# Altium footprint library Miscellaneous Devices.PcbLib: 306 footprints (part 12 of 20)
Each footprint in its own frame and in the unit in brackets; x right, y up, seen from the top. Pads: shape width x height; smd on the part's side, far side on the other; paste and mask are expansions set on the pad; w line width, h text height; cw(c..) or ccw(c..) is an arc to the next point about the centre after c.
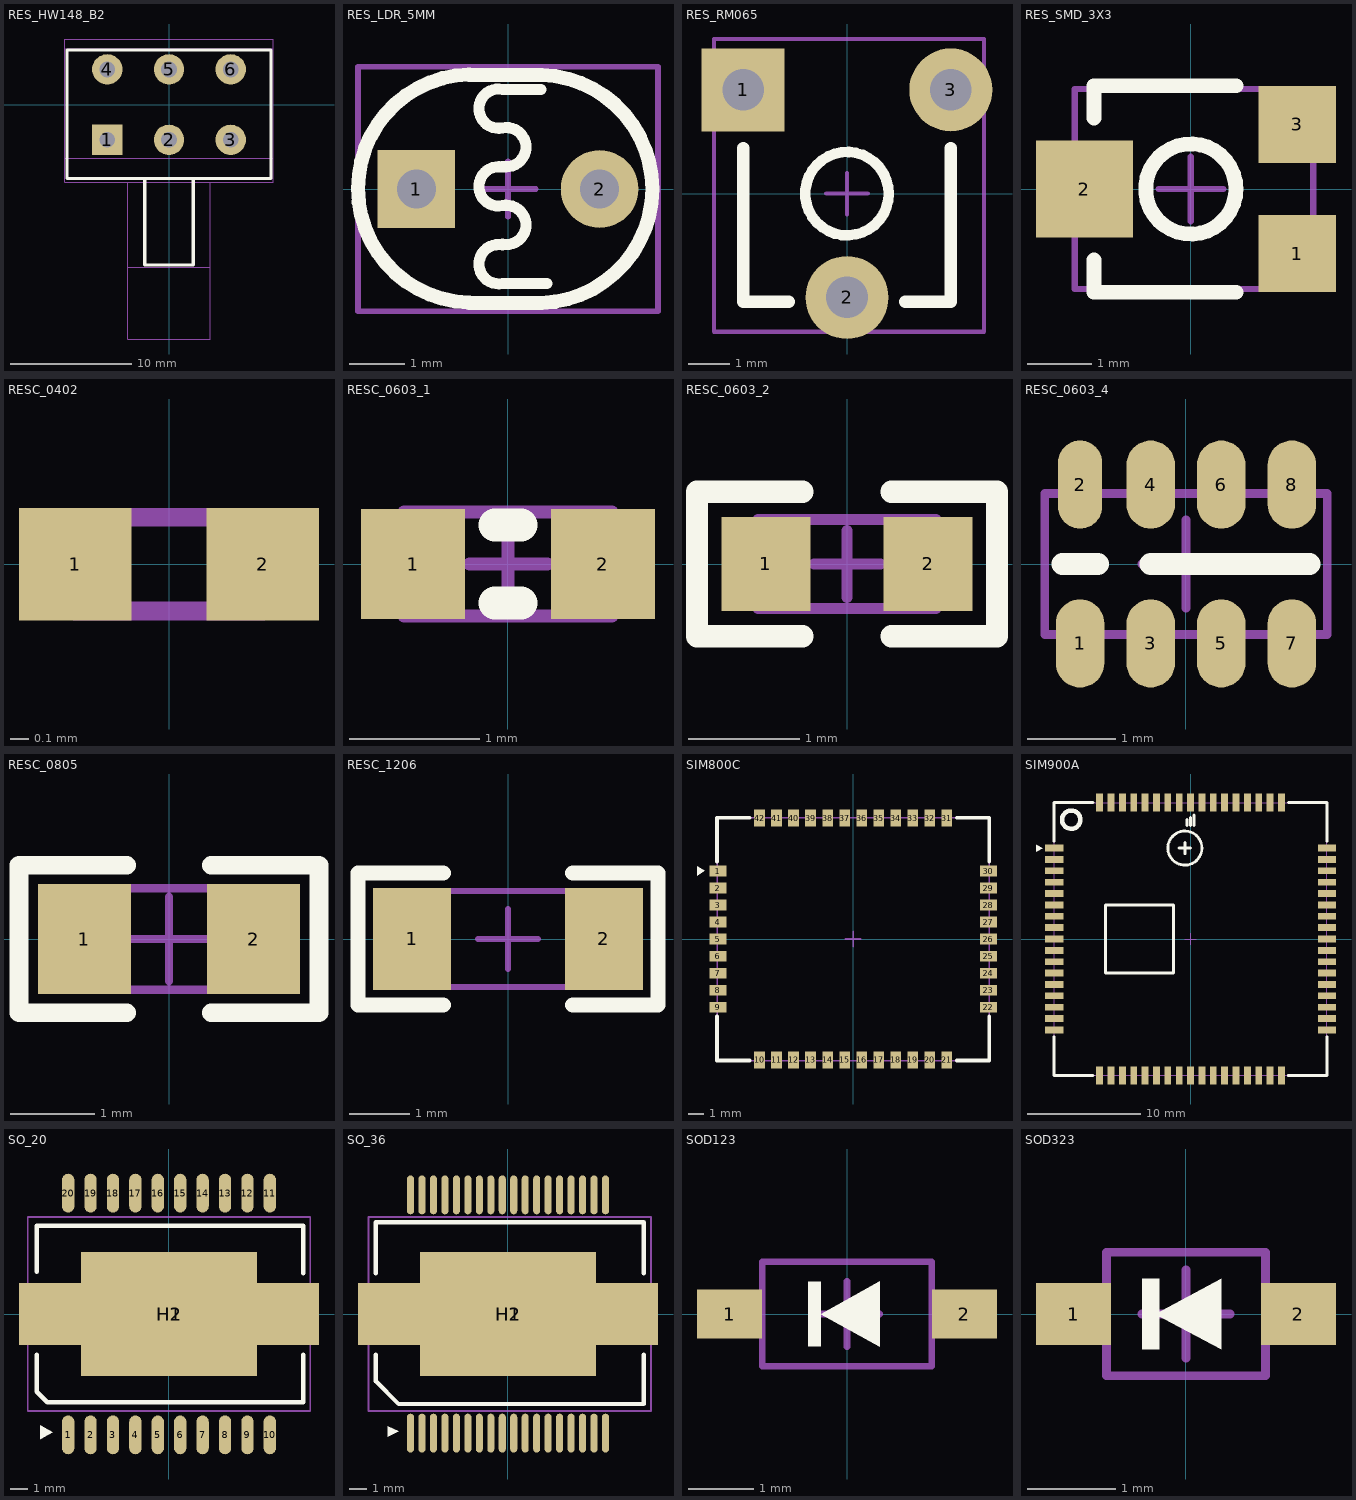
[diagram p11: the footprints below, top view; thin cyan lines are the x and y axes]

## RES_HW148_B2 [mm]
pads (6):
  rect 2.5x2.5 hole 1.3: 1(-5.08,-2.9)
  round 2.5 hole 1.3: 2(0,-2.9) 3(5.08,-2.9) 4(-5.08,2.9) 5(0,2.9) 6(5.08,2.9)
Top Overlay:
  lines w0.254: -2,-6.1 -2,-10.9 -2,-13.2 2,-13.2 2,-10.9 2,-6.1 ; -8.4,-6.1 8.4,-6.1 8.4,4.5 -8.4,4.5 -8.4,-6.1
Mechanical 15:
  lines w0.1: -3.4,-11.3 -3.4,-19.3 3.4,-19.3 3.4,-11.3 ; -3.4,-6.4 -3.4,-13.4 3.4,-13.4 3.4,-6.4 ; -8.6,-4.4 -8.6,4.6 ; -8.6,-4.4 -3.4,-4.4 3.4,-4.4 8.6,-4.4 ; -8.6,-4.4 -8.6,-6.4 8.6,-6.4 8.6,-4.4 ; -8.6,4.6 8.6,4.6 ; -8.6,4.6 -8.6,5.4 8.6,5.4 8.6,4.6 ; 8.6,-4.4 8.6,4.6
3D body: height 21.5, standoff -3, extent -8.5,-36.25 8.5,4.6

## RES_LDR_5MM [mm]
pads (2):
  rect 1.4x1.4 hole 0.7: 1(-1.65,0)
  round 1.4 hole 0.7: 2(1.65,0)
Top Overlay:
  lines w0.2: -0.1,-1.007 ccw(c-0.169,-1.353) -0.1,-1.7 0.7,-1.7 ; -0.1,-0.993 ccw(c-0.031,-0.647) -0.1,-0.3 cw(c-0.169,0.047) -0.1,0.393 ; -0.1,0.407 ccw(c-0.031,0.753) -0.1,1.1 cw(c-0.169,1.447) -0.1,1.793 0.593,1.793
  lines w0.254: -0.703,-2.044 cw(c-0.645,0.009) -0.7,2.063 ; -0.697,-2.05 0.6,-2.05 ccw(c0.545,0.002) 0.604,2.053 -0.69,2.053
Mechanical 15:
  lines w0.1: -0.5,0 0.5,0 ; 0,-0.5 0,0.5 ; -2.7,-2.2 2.7,-2.2 2.7,2.2 -2.7,2.2 -2.7,-2.2
3D body: height 2.34, standoff -2.4, extent -2.605,-2.16 2.605,2.14

## RES_RM065 [mm]
pads (3):
  rect 2x2 hole 1: 1(-2.5,2.5)
  round 2 hole 1: 2(0,-2.5) 3(2.5,2.5)
Top Overlay:
  circle w0.254: c0,0 r1.005
  lines w0.3: -2.5,1.1 -2.5,-2.6 -1.4,-2.6 ; 1.4,-2.6 2.5,-2.6 2.5,1.1
Mechanical 15:
  lines w0.1: -0.5,0 0.5,0 ; 0,-0.5 0,0.5 ; -3.2,-3.325 3.3,-3.325 3.3,3.725 -3.2,3.725 -3.2,-3.325
3D body: height 7.5, standoff -3.4, extent -3.2,-3.325 3.3,3.725

## RES_SMD_3X3 [mm]
pads (3):
  rect 1.2x1.2 smd: 1(1.65,-1) 3(1.65,1)
  rect 1.5x1.5 smd: 2(-1.65,0)
Top Overlay:
  circle w0.23: c0,0 r0.7
  lines w0.23: -1.5,-1.1 -1.5,-1.6 0.7,-1.6 ; -1.5,1.1 -1.5,1.6 0.7,1.6
Mechanical 15:
  lines w0.1: -0.5,0 0.5,0 ; 0,-0.5 0,0.5 ; -1.8,-1.55 -1.8,1.55 1.9,1.55 1.9,-1.55 -1.8,-1.55
3D body: height 1.95, standoff 0, extent -1.795,-1.55 1.895,1.55

## RESC_0402 [mm]
pads (2):
  rect 0.6x0.6 smd mask+0.051: 1(-0.5,0) 2(0.5,0)
Mechanical 15:
  lines w0.1: -0.5,-0.25 0.5,-0.25 0.5,0.25 -0.5,0.25 -0.5,-0.25
3D body: height 0.38, standoff 0, extent -0.5,-0.25 0.5,0.25

## RESC_0603_1 [mm]
pads (2):
  rect 0.8x0.85 smd: 1(-0.73,0) 2(0.73,0)
Top Overlay:
  lines w0.254: -0.1,-0.3 0.1,-0.3 ; -0.1,0.3 0.1,0.3
Mechanical 15:
  lines w0.1: -0.297,0 0.303,0 ; 0,-0.3 0,0.3 ; -0.8,-0.4 0.8,-0.4 0.8,0.4 -0.8,0.4 -0.8,-0.4
3D body: height 0.38, standoff 0, extent -0.8,-0.4 0.8,0.4

## RESC_0603_2 [mm]
pads (2):
  rect 0.8x0.85 smd: 1(-0.73,0) 2(0.73,0)
Top Overlay:
  lines w0.2: -0.4,-0.65 -1.35,-0.65 -1.35,0.65 -0.4,0.65 ; 0.4,-0.65 1.35,-0.65 1.35,0.65 0.4,0.65
Mechanical 15:
  lines w0.1: -0.297,0 0.303,0 ; 0,-0.3 0,0.3 ; -0.8,-0.4 -0.8,0.4 0.8,0.4 0.8,-0.4 -0.8,-0.4
3D body: height 0.38, standoff 0, extent -0.8,-0.4 0.8,0.4

## RESC_0603_4 [mm]
pads (8):
  oval 0.55x1 smd: 1(-1.2,-0.9) 3(-0.4,-0.9) 4(-0.4,0.9) 5(0.4,-0.9) 6(0.4,0.9) 7(1.2,-0.9) 8(1.2,0.9)
  oval 0.5x1 smd: 2(-1.2,0.9)
Top Overlay:
  lines w0.254: -1.4,0 -1,0 ; -0.4,0 1.4,0
Mechanical 15:
  lines w0.1: -0.5,0 0.5,0 ; 0,-0.5 0,0.5 ; -1.6,-0.8 -1.6,0.8 1.6,0.8 1.6,-0.8 -1.6,-0.8
3D body: height 0.5, standoff 0, extent -1.6,-0.8 1.6,0.8

## RESC_0805 [mm]
pads (2):
  rect 1.1x1.3 smd: 1(-1,0) 2(1,0)
Top Overlay:
  lines w0.22: -0.5,-0.875 -1.775,-0.875 -1.775,0.875 -0.5,0.875 ; 0.5,-0.875 1.775,-0.875 1.775,0.875 0.5,0.875
Mechanical 15:
  lines w0.1: -0.5,0 0.5,0 ; 0,-0.5 0,0.5 ; -1,-0.6 1,-0.6 1,0.6 -1,0.6 -1,-0.6
3D body: height 0.5, standoff 0, extent -1,-0.6 1,0.6

## RESC_1206 [mm]
pads (2):
  rect 1.3x1.7 smd: 1(-1.6,0) 2(1.6,0)
Top Overlay:
  lines w0.254: -1.079,-1.1 -2.5,-1.1 -2.5,1.1 -1.079,1.1 ; 1.08,-1.1 2.5,-1.1 2.5,1.1 1.08,1.1
Mechanical 15:
  lines w0.1: -0.5,0 0.5,0 ; 0,-0.5 0,0.5 ; -1.6,-0.8 -1.6,0.8 1.6,0.8 1.6,-0.8 -1.6,-0.8
3D body: height 0.6, standoff 0, extent -1.6,-0.8 1.6,0.8

## SIM800C [mm]
pads (42):
  rect 1.1x0.7 smd: 1(-8.75,4.39) 2(-8.75,3.29) 3(-8.75,2.19) 4(-8.75,1.09) 5(-8.75,-0.01) 6(-8.75,-1.11) 7(-8.75,-2.21) 8(-8.75,-3.31) 9(-8.75,-4.41) 22(8.75,-4.41) 23(8.75,-3.31) 24(8.75,-2.21) 25(8.75,-1.11) 26(8.75,-0.01) 27(8.75,1.09) 28(8.75,2.19) 29(8.75,3.29) 30(8.75,4.39)
  rect 0.7x1.1 smd: 10(-6.05,-7.81) 11(-4.95,-7.81) 12(-3.85,-7.81) 13(-2.75,-7.81) 14(-1.65,-7.81) 15(-0.55,-7.81) 16(0.55,-7.81) 17(1.65,-7.81) 18(2.75,-7.81) 19(3.85,-7.81) 20(4.95,-7.81) 21(6.05,-7.81) 31(6.05,7.81) 32(4.95,7.81) 33(3.85,7.81) 34(2.75,7.81) 35(1.65,7.81) 36(0.55,7.81) 37(-0.55,7.81) 38(-1.65,7.81) 39(-2.75,7.81) 40(-3.85,7.81) 41(-4.95,7.81) 42(-6.05,7.81)
Top Overlay:
  region: -9.6,4.4 -10.1,4.7 -10.1,4.1
  lines w0.254: -8.8,-5 -8.8,-7.86 -6.7,-7.86 ; -8.8,5 -8.8,7.84 -6.7,7.84 ; 6.7,-7.86 8.8,-7.86 8.8,-5 ; 6.7,7.84 8.8,7.84 8.8,5
Mechanical 15:
  lines w0.1: -0.5,0 0.5,0 ; 0,-0.5 0,0.5 ; -8.8,-7.86 -8.8,7.84 8.8,7.84 8.8,-7.86 -8.8,-7.86
3D body: height 2.37, standoff 0.03, extent -8.8,-7.86 8.8,7.84

## SIM900A [mm]
pads (68):
  rect 1.6x0.6 smd: 1(-12,8) 2(-12,7) 3(-12,6) 4(-12,5) 5(-12,4) 6(-12,3) 7(-12,2) 8(-12,1) 9(-12,0) 10(-12,-1) 11(-12,-2) 12(-12,-3) 13(-12,-4) 14(-12,-5) 15(-12,-6) 16(-12,-7) 17(-12,-8) 35(12,-8) 36(12,-7) 37(12,-6) 38(12,-5) 39(12,-4) 40(12,-3) 41(12,-2) 42(12,-1) 43(12,0) 44(12,1) 45(12,2) 46(12,3) 47(12,4) 48(12,5) 49(12,6) 50(12,7) 51(12,8)
  rect 0.6x1.6 smd: 18(-8,-12) 19(-7,-12) 20(-6,-12) 21(-5,-12) 22(-4,-12) 23(-3,-12) 24(-2,-12) 25(-1,-12) 26(0,-12) 27(1,-12) 28(2,-12) 29(3,-12) 30(4,-12) 31(5,-12) 32(6,-12) 33(7,-12) 34(8,-12) 52(8,12) 53(7,12) 54(6,12) 55(5,12) 56(4,12) 57(3,12) 58(2,12) 59(1,12) 60(0,12) 61(-1,12) 62(-2,12) 63(-3,12) 64(-4,12) 65(-5,12) 66(-6,12) 67(-7,12) 68(-8,12)
Top Overlay:
  circle w0.4: c-10.5,10.5 r0.806
  circle w0.254: c-0.5,8 r1.5
  region: -13,8 -13.6,8.3 -13.6,7.7
  lines w0.254: -12,-8.6 -12,-12 -8.6,-12 ; -12,8.6 -12,12 -8.6,12 ; -1,8 0,8 ; -0.5,7.5 -0.5,8.5 ; -0.3,10 -0.3,10.5 ; 0,10 0,10.7 ; 0.3,10 0.3,10.9 ; 8.6,-12 12,-12 12,-8.6 ; 8.637,12 12,12 12,8.6 ; -7.5,-3 -1.5,-3 -1.5,3 -7.5,3 -7.5,-3
Mechanical 15:
  lines w0.1: -0.5,0 0.5,0 ; 0,-0.5 0,0.5 ; -12,-12 -12,12 12,12 12,-12 -12,-12
3D body: height 3.02, standoff 0, extent -12,-12 12,12

## SO_20 [mm]
pads (22):
  oval 0.7x2.2 smd: 1(-5.715,-6.85) 2(-4.445,-6.85) 3(-3.175,-6.85) 4(-1.905,-6.85) 5(-0.635,-6.85) 6(0.635,-6.85) 7(1.905,-6.85) 8(3.175,-6.85) 9(4.445,-6.85) 10(5.715,-6.85) 11(5.715,6.85) 12(4.445,6.85) 13(3.175,6.85) 14(1.905,6.85) 15(0.635,6.85) 16(-0.635,6.85) 17(-1.905,6.85) 18(-3.175,6.85) 19(-4.445,6.85) 20(-5.715,6.85)
  rect 17x3.5 smd: H1(0,0)
  rect 10x7 smd: H2(0,0)
Top Overlay:
  region: -6.6,-6.7 -7.3,-6.3 -7.3,-7.1
  lines w0.254: -7.5,-2.3 -7.5,-4.4 -6.9,-5 7.6,-5 7.6,-2.3 ; -7.5,2.4 -7.5,5 7.6,5 7.6,2.3
Mechanical 15:
  lines w0.1: -8,-5.5 8,-5.5 8,5.5 -8,5.5 -8,-5.5
3D body: height 3.6, standoff 0, extent -8,-7.2 8,7.2

## SO_36 [mm]
pads (38):
  oval 0.4x2.2 smd mask+0.051: 1(-5.525,-6.75) 2(-4.875,-6.75) 3(-4.225,-6.75) 4(-3.575,-6.75) 5(-2.925,-6.75) 6(-2.275,-6.75) 7(-1.625,-6.75) 8(-0.975,-6.75) 9(-0.325,-6.75) 10(0.325,-6.75) 11(0.975,-6.75) 12(1.625,-6.75) 13(2.275,-6.75) 14(2.925,-6.75) 15(3.575,-6.75) 16(4.225,-6.75) 17(4.875,-6.75) 18(5.525,-6.75) 19(5.525,6.75) 20(4.875,6.75) 21(4.225,6.75) 22(3.575,6.75) 23(2.925,6.75) 24(2.275,6.75) 25(1.625,6.75) 26(0.975,6.75) 27(0.325,6.75) 28(-0.325,6.75) 29(-0.975,6.75) 30(-1.625,6.75) 31(-2.275,6.75) 32(-2.925,6.75) 33(-3.575,6.75) 34(-4.225,6.75) 35(-4.875,6.75) 36(-5.525,6.75)
  rect 17x3.5 smd: H1(0,0)
  rect 10x7 smd: H2(0,0)
Top Overlay:
  region: -6.2,-6.65 -6.8,-6.35 -6.8,-6.95
  lines w0.254: -7.5,-2.3 -7.5,-3.8 -6.2,-5.1 7.7,-5.1 7.7,-2.3 ; -7.5,2.3 -7.5,5.2 7.7,5.2 7.7,2.3
Mechanical 15:
  lines w0.1: -7.9,-5.5 8.1,-5.5 8.1,5.5 -7.9,5.5 -7.9,-5.5
3D body: height 3.5, standoff 0, extent -7.835,-7.1 8.115,7.1

## SOD123 [mm]
pads (2):
  rect 1x0.75 smd: 1(-1.8,0) 2(1.8,0)
Top Overlay:
  region: -0.4,-0.5 -0.4,0.5 -0.6,0.5 -0.6,-0.5
  region: 0.5,0.5 0.5,-0.5 -0.4,0
Mechanical 15:
  lines w0.1: -0.5,0 0.5,0 ; 0,-0.5 0,0.5 ; -1.3,-0.8 1.3,-0.8 1.3,0.8 -1.3,0.8 -1.3,-0.8
3D body: height 1.27, standoff 0, extent -1.85,-0.8 1.85,0.8

## SOD323 [mm]
pads (2):
  rect 0.85x0.7 smd: 1(-1.275,0) 2(1.275,0)
Top Overlay:
  rectangle: -0.5,-0.4 -0.3,0.4
  region: 0.4,0.4 0.4,-0.4 -0.35,0
Mechanical 15:
  lines w0.1: -0.5,0 0.5,0 ; 0,-0.5 0,0.5 ; -0.9,-0.7 -0.9,0.7 0.9,0.7 0.9,-0.7 -0.9,-0.7
3D body: height 0.79, standoff -0.08, extent -1.35,-0.67 1.35,0.68